# EAGLE library part RTL8723DS-CG (library RTL8723DS-CG)
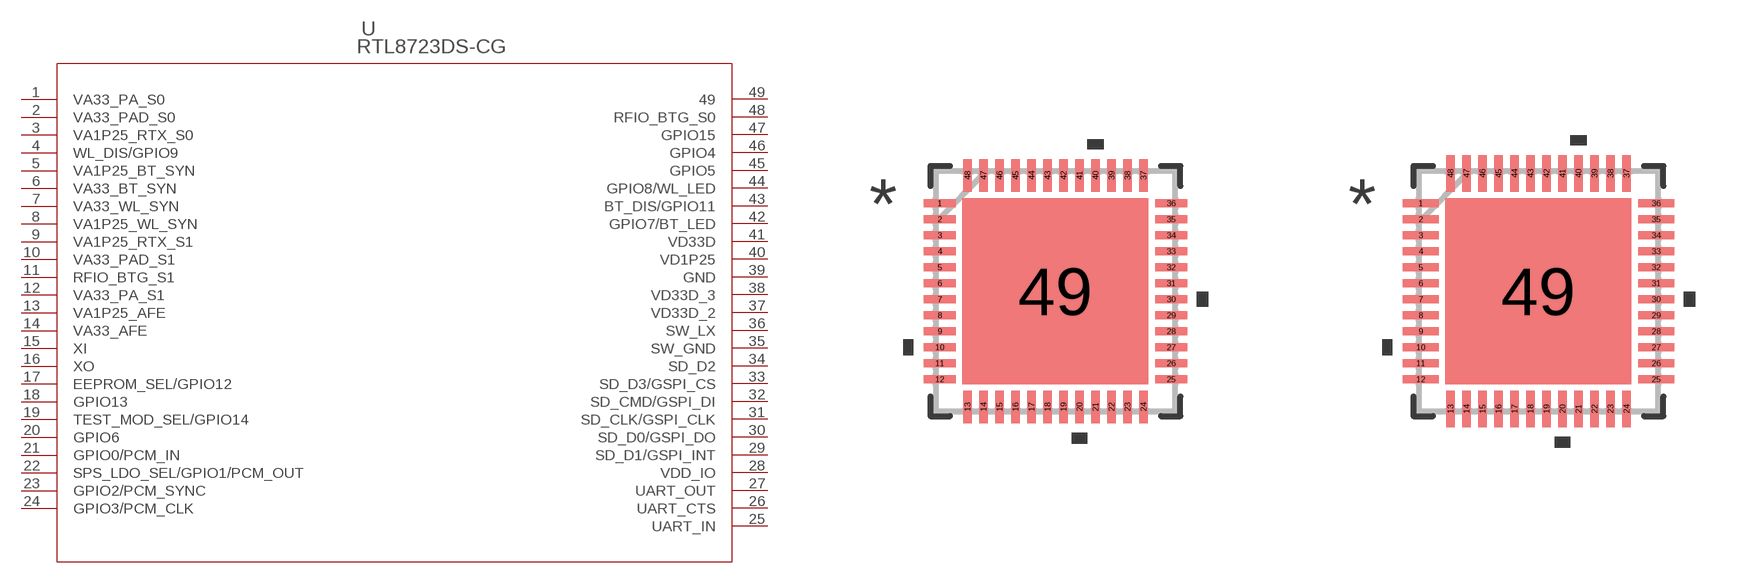
[diagram p0: symbol with the pads of QFN48_RTL8723_RTK; footprints QFN48_RTL8723_RTK, QFN48_RTL8723_RTK-M]

Designator prefix U

## RTL8723DS-CGQFN48_RTL8723_RTK (Copyright: Copyright (C) 2026 Ultra Librarian. All rights reserved.; Manufacturer_Name: Realtek; Manufacturer_Part_Number: RTL8723DS-CG; Type: Controller)  [QFN48_RTL8723_RTK]
1  VA33_PA_S0
2  VA33_PAD_S0
3  VA1P25_RTX_S0
4  WL_DIS/GPIO9
5  VA1P25_BT_SYN
6  VA33_BT_SYN
7  VA33_WL_SYN
8  VA1P25_WL_SYN
9  VA1P25_RTX_S1
10  VA33_PAD_S1
11  RFIO_BTG_S1
12  VA33_PA_S1
13  VA1P25_AFE
14  VA33_AFE
15  XI  in
16  XO  out
17  EEPROM_SEL/GPIO12  in
18  GPIO13
19  TEST_MOD_SEL/GPIO14  in
20  GPIO6
21  GPIO0/PCM_IN
22  SPS_LDO_SEL/GPIO1/PCM_OUT
23  GPIO2/PCM_SYNC
24  GPIO3/PCM_CLK
25  UART_IN  in
26  UART_CTS  in
27  UART_OUT  out
28  VDD_IO  pwr
29  SD_D1/GSPI_INT
30  SD_D0/GSPI_DO
31  SD_CLK/GSPI_CLK
32  SD_CMD/GSPI_DI
33  SD_D3/GSPI_CS
34  SD_D2
35  SW_GND  pas
36  SW_LX  out
37  VD33D_2
38  VD33D_3
39  GND  pas
40  VD1P25
41  VD33D
42  GPIO7/BT_LED
43  BT_DIS/GPIO11
44  GPIO8/WL_LED
45  GPIO5
46  GPIO4
47  GPIO15
48  RFIO_BTG_S0
49  49  pas

## RTL8723DS-CGQFN48_RTL8723_RTK-M (Copyright: Copyright (C) 2026 Ultra Librarian. All rights reserved.; Manufacturer_Name: Realtek; Manufacturer_Part_Number: RTL8723DS-CG; Type: Controller)  [QFN48_RTL8723_RTK-M]
Pads as for QFN48_RTL8723_RTK

## RTL8723DS-CGQFN48_RTL8723_RTK-L (Copyright: Copyright (C) 2026 Ultra Librarian. All rights reserved.; Manufacturer_Name: Realtek; Manufacturer_Part_Number: RTL8723DS-CG; Type: Controller)  [QFN48_RTL8723_RTK-L]
Pads as for QFN48_RTL8723_RTK

## Footprint QFN48_RTL8723_RTK (pad centres in mm)
smd 0.808 x 0.204: 1 -2.893,2.2; 2 -2.893,1.8; 3 -2.893,1.4; 4 -2.893,1; 5 -2.893,0.6; 6 -2.893,0.2; 7 -2.893,-0.2; 8 -2.893,-0.6; 9 -2.893,-1; 10 -2.893,-1.4; 11 -2.893,-1.8; 12 -2.893,-2.2; 25 2.893,-2.2; 26 2.893,-1.8; 27 2.893,-1.4; 28 2.893,-1; 29 2.893,-0.6; 30 2.893,-0.2; 31 2.893,0.2; 32 2.893,0.6; 33 2.893,1; 34 2.893,1.4; 35 2.893,1.8; 36 2.893,2.2
smd 0.204 x 0.808: 13 -2.2,-2.893; 14 -1.8,-2.893; 15 -1.4,-2.893; 16 -1,-2.893; 17 -0.6,-2.893; 18 -0.2,-2.893; 19 0.2,-2.893; 20 0.6,-2.893; 21 1,-2.893; 22 1.4,-2.893; 23 1.8,-2.893; 24 2.2,-2.893; 37 2.2,2.893; 38 1.8,2.893; 39 1.4,2.893; 40 1,2.893; 41 0.6,2.893; 42 0.2,2.893; 43 -0.2,2.893; 44 -0.6,2.893; 45 -1,2.893; 46 -1.4,2.893; 47 -1.8,2.893; 48 -2.2,2.893
smd 4.648 x 4.648: 49 0,0

## Footprint QFN48_RTL8723_RTK-M (pad centres in mm)
smd 0.908 x 0.204: 1 -2.943,2.2; 2 -2.943,1.8; 3 -2.943,1.4; 4 -2.943,1; 5 -2.943,0.6; 6 -2.943,0.2; 7 -2.943,-0.2; 8 -2.943,-0.6; 9 -2.943,-1; 10 -2.943,-1.4; 11 -2.943,-1.8; 12 -2.943,-2.2; 25 2.943,-2.2; 26 2.943,-1.8; 27 2.943,-1.4; 28 2.943,-1; 29 2.943,-0.6; 30 2.943,-0.2; 31 2.943,0.2; 32 2.943,0.6; 33 2.943,1; 34 2.943,1.4; 35 2.943,1.8; 36 2.943,2.2
smd 0.204 x 0.908: 13 -2.2,-2.943; 14 -1.8,-2.943; 15 -1.4,-2.943; 16 -1,-2.943; 17 -0.6,-2.943; 18 -0.2,-2.943; 19 0.2,-2.943; 20 0.6,-2.943; 21 1,-2.943; 22 1.4,-2.943; 23 1.8,-2.943; 24 2.2,-2.943; 37 2.2,2.943; 38 1.8,2.943; 39 1.4,2.943; 40 1,2.943; 41 0.6,2.943; 42 0.2,2.943; 43 -0.2,2.943; 44 -0.6,2.943; 45 -1,2.943; 46 -1.4,2.943; 47 -1.8,2.943; 48 -2.2,2.943
smd 4.648 x 4.648: 49 0,0

## Footprint QFN48_RTL8723_RTK-L (pad centres in mm)
smd 0.708 x 0.204: 1 -2.843,2.2; 2 -2.843,1.8; 3 -2.843,1.4; 4 -2.843,1; 5 -2.843,0.6; 6 -2.843,0.2; 7 -2.843,-0.2; 8 -2.843,-0.6; 9 -2.843,-1; 10 -2.843,-1.4; 11 -2.843,-1.8; 12 -2.843,-2.2; 25 2.843,-2.2; 26 2.843,-1.8; 27 2.843,-1.4; 28 2.843,-1; 29 2.843,-0.6; 30 2.843,-0.2; 31 2.843,0.2; 32 2.843,0.6; 33 2.843,1; 34 2.843,1.4; 35 2.843,1.8; 36 2.843,2.2
smd 0.204 x 0.708: 13 -2.2,-2.843; 14 -1.8,-2.843; 15 -1.4,-2.843; 16 -1,-2.843; 17 -0.6,-2.843; 18 -0.2,-2.843; 19 0.2,-2.843; 20 0.6,-2.843; 21 1,-2.843; 22 1.4,-2.843; 23 1.8,-2.843; 24 2.2,-2.843; 37 2.2,2.843; 38 1.8,2.843; 39 1.4,2.843; 40 1,2.843; 41 0.6,2.843; 42 0.2,2.843; 43 -0.2,2.843; 44 -0.6,2.843; 45 -1,2.843; 46 -1.4,2.843; 47 -1.8,2.843; 48 -2.2,2.843
smd 4.648 x 4.648: 49 0,0